# EAGLE library part 1852 (library k1)
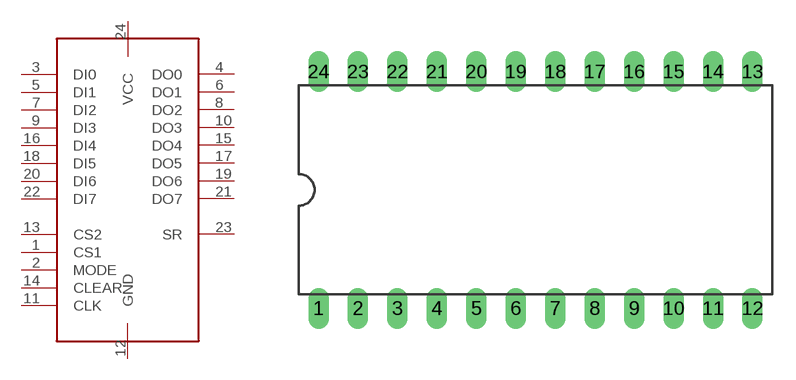
[diagram p2: symbol with the pads of DIL24; footprint DIL24]

Designator prefix -

## 1852  [DIL24]
1  CS1  in
2  MODE  in
3  DI0  in
4  DO0  out
5  DI1  in
6  DO1  out
7  DI2  in
8  DO2  out
9  DI3  in
10  DO3  out
11  CLK  in
12  GND  pwr
13  CS2  in
14  CLEAR  in
15  DO4  out
16  DI4  in
17  DO5  out
18  DI5  in
19  DO6  out
20  DI6  in
21  DO7  out
22  DI7  in
23  SR  out
24  VCC  sup

## Footprint DIL24 (pad centres in mm)
Dual In Line Package
drill 0.813 long: 1 -13.97,-7.62; 2 -11.43,-7.62; 3 -8.89,-7.62; 4 -6.35,-7.62; 5 -3.81,-7.62; 6 -1.27,-7.62; 7 1.27,-7.62; 8 3.81,-7.62; 9 6.35,-7.62; 10 8.89,-7.62; 11 11.43,-7.62; 12 13.97,-7.62; 13 13.97,7.62; 14 11.43,7.62; 15 8.89,7.62; 16 6.35,7.62; 17 3.81,7.62; 18 1.27,7.62; 19 -1.27,7.62; 20 -3.81,7.62; 21 -6.35,7.62; 22 -8.89,7.62; 23 -11.43,7.62; 24 -13.97,7.62